# Altium schematic symbol library aeronist-Schematic-Lib.SchLib: 75 symbols (part 2 of 2)
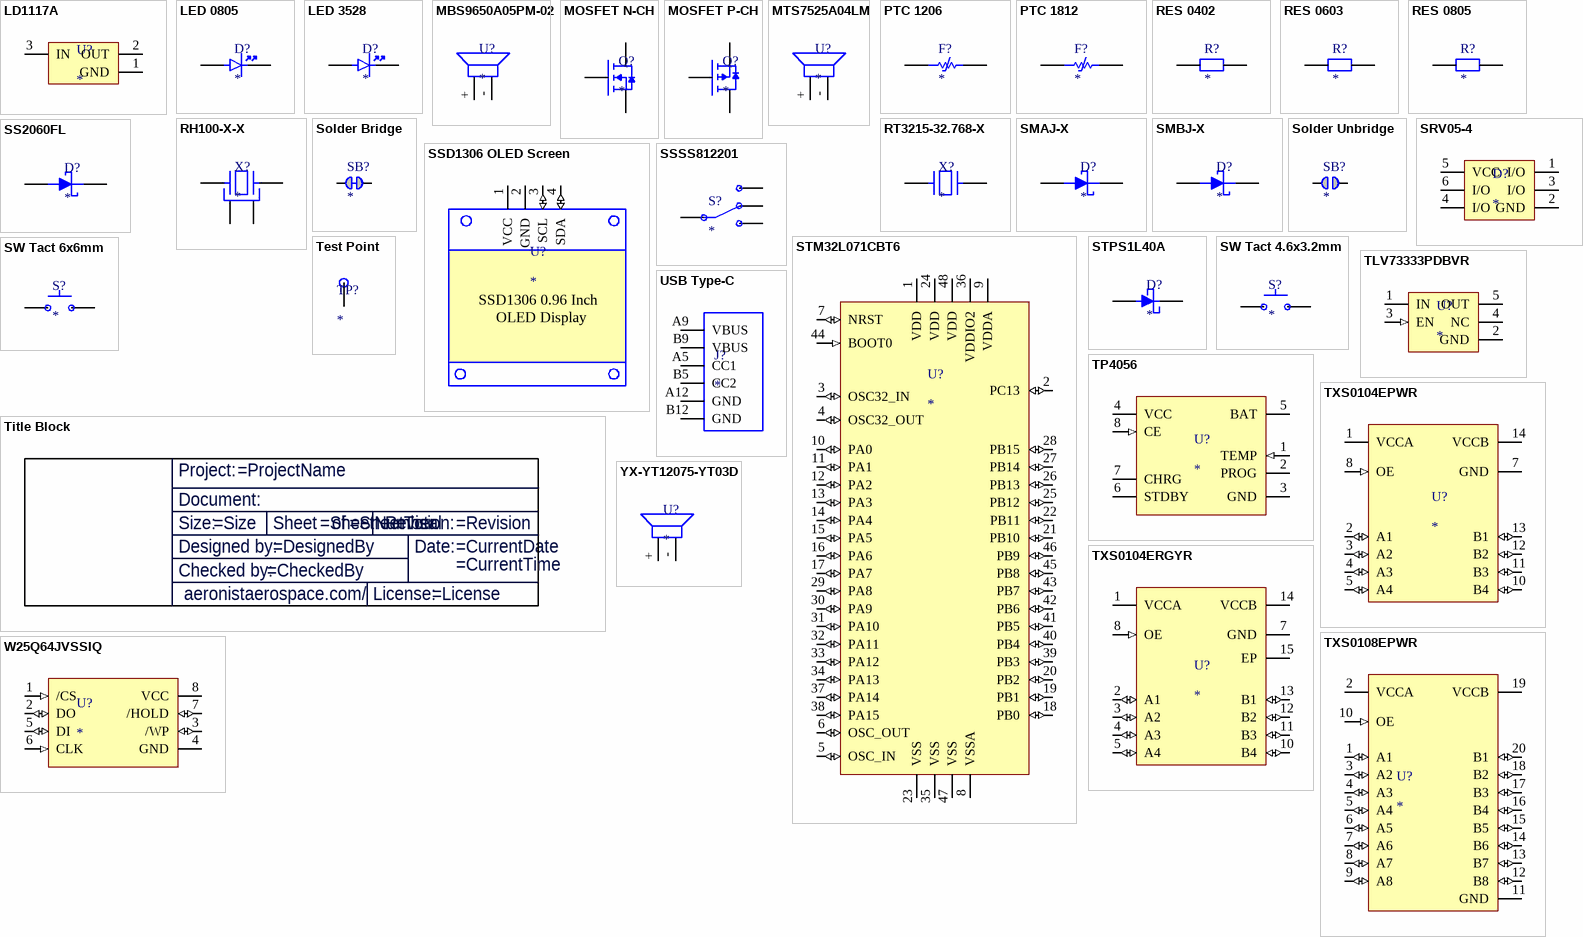
[diagram p2: symbols LD1117A to YX-YT12075-YT03D]

## STPS1L40A
designator D?
Rectifier Diode, Schottky, 1 Phase, 1 Element, 1A, 40V V(RRM), Silicon, DO-214AC; Manufacturer: STMicroelectronics; Manufacturer Part Number: STPS1L40A; Element Configuration: Single; Forward Voltage: 630mV; Max Forward Surge Current (Ifsm): 60A; Max Junction Temperature (Tj): 175°C; Max Reverse Leakage Current: 35µA; Number of Elements: 1; Peak Non-Repetitive Surge Current: 50A; Polarity: Standard; Supplier: Farnell; Supplier Part Number: 1697510; RoHS: Compliant; Category: Schottky Diodes; Stock: 13992; Pricing: 5=0,335, 10=0,209, 100=0,151, 500=0,113, 1000=0,0899, 5000=0,0842 (EUR); Average Rectified Current: 1A; Case/Package: SMA; China RoHS: Non-Compliant; Contact Plating: Tin; Current Rating: 1A; Forward Current: 1A; Height: 2.45mm; Lead Free: Lead Free; Length: 4.6mm; Lifecycle Status: Production; Max Operating Temperature: 150°C; Max Output current: 1A; Max Repetitive Reverse Voltage (Vrrm): 40V; Max Reverse Voltage (DC): 40V; Max Surge Current: 60A; Min Operating Temperature: -65°C; Mounting Technology: Surface Mount; Pins: 2; Number of Terminals: 2; Output Current: 1A; Packaging: Tape and Reel; Peak Reverse Current: 35µA; Radiation Hardening: No; REACH SVHC: No; Reverse Standoff Voltage: 40V; Schedule B: 8541100080, 8541100080|8541100080|8541100080|8541100080|8541100080; Termination: SMD/SMT; Voltage Rating (DC): 40V; Width: 2.95mm; ComponentLink1URL: https://datasheet.octopart.com:443/STPS1L40A-STMicroelectronics-datasheet-8130128.pdf?src-supplier=element14+APAC; ComponentLink1Description: https://datasheet.octopart.com:443/STPS1L40A-STMicroelectronics-datasheet-8130128.pdf?src-supplier=element14+APAC; ComponentLink2URL: https://datasheet.octopart.com:443/STPS1L40A-STMicroelectronics-datasheet-12555403.pdf?src-supplier=TME; ComponentLink2Description: https://datasheet.octopart.com:443/STPS1L40A-STMicroelectronics-datasheet-12555403.pdf?src-supplier=TME; ComponentLink3URL: https://datasheet.octopart.com:443/STPS1L40A-STMicroelectronics-datasheet-67360113.pdf?src-supplier=Future+Electronics; ComponentLink3Description: https://datasheet.octopart.com:443/STPS1L40A-STMicroelectronics-datasheet-67360113.pdf?src-supplier=Future+Electronics; ComponentLink4URL: https://datasheet.octopart.com:443/STPS1L40A-STMicroelectronics-datasheet-56319.pdf?src-supplier=Mouser; ComponentLink4Description: https://datasheet.octopart.com:443/STPS1L40A-STMicroelectronics-datasheet-56319.pdf?src-supplier=Mouser; ComponentLink5URL: https://datasheet.octopart.com:443/STPS1L40A-STMicroelectronics-datasheet-14054142.pdf?src-supplier=iiiC; ComponentLink5Description: https://datasheet.octopart.com:443/STPS1L40A-STMicroelectronics-datasheet-14054142.pdf?src-supplier=iiiC
footprint SMA (SMA, 2-Leads, Body 4,28x2,58mm, IPC Low Density)
pins: 1 A, 2 K

## SW Tact 4.6x3.2mm
designator S?
4.6×3.2 mm tactile push-button switch, SPST, momentary, SMD.
footprint SW TACT 4.6X3.2MM
pins: 2, 4

## SW Tact 6x6mm
designator S?
6×6 mm tactile push-button switch, SPST, momentary, SMD.
footprint SW TACT 6X6MM (6×6 mm SMD tactile switch, 4 pads)
pins: 2, 4

## Test Point
designator TP?
Test Point, PCB Pad Only, Ø1.2mm
footprint Test Point (Test Point, PCB Pad Only, Ø1.2mm)
pins: TP

## Title Block
designator ?  (graphical)
text: Project:; Document:; Size:; Sheet; of; Revision:; Designed by:; Date:; Checked by:; aeronistaerospace.com/; License:

## TLV73333PDBVR
designator U?
300-mA, capacitor-free, low-IQ, low-dropout voltage regulator with enable 5-SOT-23 -40 to 125; Manufacturer: Texas Instruments; Manufacturer Part Number: TLV73333PDBVR; Manufacturer Lifecycle Status: ACTIVE; Accuracy: 1%; Dropout Voltage: 125mV; Max Supply Voltage: 5.5V; Max Junction Temperature (Tj): 125°C; Max Output current: 300mA; Min Current Limit: 360mA; Min Input Voltage: 1.4V; Nominal Supply Current: 34µA; Number of Channels: 1; Output Type: Fixed; Output Voltage: 3.3V; Polarity: Positive; Quiescent Current: 60µA; Supplier: Mouser; Supplier Part Number: 595-TLV73333PDBVR; RoHS: Compliant; Category: LDO Voltage Regulators; Stock: 12067; Pricing: 1=0,17, 10=0,115, 50=0,101, 100=0,086, 1000=0,07, 10000=0,062 (USD); Case/Package: SOT-23; Contact Plating: Gold; Height: 1.45mm; Lead Free: Lead Free; Length: 2.9mm; Lifecycle Status: Production; Max Operating Temperature: 125°C; Min Operating Temperature: -40°C; Min Supply Voltage: 1.4V; Mounting Technology: Surface Mount; Number of Outputs: 1; Pins: 5; Number of Regulators: 1; Output Current: 300mA; Packaging: Tape & Reel; Radiation Hardening: No; Schedule B: 8542390000, 8542390000|8542390000|8542390000|8542390000|8542390000; Thickness: 1.2mm; Weight: 15.790684mg; Width: 1.6mm; ComponentLink1URL: https://sigma.octopart.com:443/177332311/technical_drawing/Texas-Instruments-TLV73333PDBVR.pdf?src-supplier=Texas+Instruments; ComponentLink1Description: https://sigma.octopart.com:443/177332311/technical_drawing/Texas-Instruments-TLV73333PDBVR.pdf?src-supplier=Texas+Instruments; ComponentLink2URL: https://octopart.com:443/opatz8j6/c1?t=30rxbCOKURE0fvLotVHr2--9yC-4hWgg0fjorl7QajC5RXkKBG22M4ZWLOTtqEVkHrkQWGSvUBCT4JzFCKRza57xxEH2AM5zMdrmzUF7HUn0SZ7VrBnq1qaBEhnASKZ9K6cpMGD6K96mHw2RuAXFnqi8r3hf25pr5WVy_93zC9DtrJ2-QNFvwlrZk1EXJAO4qYO9518NXgqDx2DdBm28by8vGuJzgOvU8mXkfRtT8k19nHvP1ZfIaADJPU6FeaqlEbd-j24xmPfxYt-FfVEHWXt0tW1yZYApp5WPtqSvL-aKGKcx1420oXKrzNb7imis-_kE6QqMT633l-x_OdY6nHSWd6_HrFJGfkvfwlphIUbgO9Y3y8pg3cXI5t7uujLqBDPZRvw&src-supplier=Texas+Instruments; ComponentLink2Description: https://octopart.com:443/opatz8j6/c1?t=30rxbCOKURE0fvLotVHr2--9yC-4hWgg0fjorl7QajC5RXkKBG22M4ZWLOTtqEVkHrkQWGSvUBCT4JzFCKRza57xxEH2AM5zMdrmzUF7HUn0SZ7VrBnq1qaBEhnASKZ9K6cpMGD6K96mHw2RuAXFnqi8r3hf25pr5WVy_93zC9DtrJ2-QNFvwlrZk1EXJAO4qYO9518NXgqDx2DdBm28by8vGuJzgOvU8mXkfRtT8k19nHvP1ZfIaADJPU6FeaqlEbd-j24xmPfxYt-FfVEHWXt0tW1yZYApp5WPtqSvL-aKGKcx1420oXKrzNb7imis-_kE6QqMT633l-x_OdY6nHSWd6_HrFJGfkvfwlphIUbgO9Y3y8pg3cXI5t7uujLqBDPZRvw&src-supplier=Texas+Instruments; ComponentLink3URL: https://sigma.octopart.com:443/175570406/technical_drawing/Texas-Instruments-TLV73333PDBVR.pdf?src-supplier=Texas+Instruments; ComponentLink3Description: https://sigma.octopart.com:443/175570406/technical_drawing/Texas-Instruments-TLV73333PDBVR.pdf?src-supplier=Texas+Instruments; ComponentLink4URL: https://sigma.octopart.com:443/169406034/technical_drawing/Texas-Instruments-TLV73333PDBVR.pdf?src-supplier=Texas+Instruments; ComponentLink4Description: https://sigma.octopart.com:443/169406034/technical_drawing/Texas-Instruments-TLV73333PDBVR.pdf?src-supplier=Texas+Instruments; ComponentLink5URL: https://sigma.octopart.com:443/155939316/technical_drawing/Texas-Instruments-TLV73333PDBVR.pdf?src-supplier=Texas+Instruments; ComponentLink5Description: https://sigma.octopart.com:443/155939316/technical_drawing/Texas-Instruments-TLV73333PDBVR.pdf?src-supplier=Texas+Instruments; ComponentLink6URL: https://sigma.octopart.com:443/102331370/technical_drawing/Texas-Instruments-TLV73333PDBVR.pdf?src-supplier=Texas+Instruments; ComponentLink6Description: https://sigma.octopart.com:443/102331370/technical_drawing/Texas-Instruments-TLV73333PDBVR.pdf?src-supplier=Texas+Instruments; ComponentLink7URL: https://datasheet.octopart.com:443/TLV73333PDBVR-Texas-Instruments-datasheet-37736395.pdf?src-supplier=Texas+Instruments; ComponentLink7Description: https://datasheet.octopart.com:443/TLV73333PDBVR-Texas-Instruments-datasheet-37736395.pdf?src-supplier=Texas+Instruments; ComponentLink8URL: https://datasheet.octopart.com:443/TLV73333PDBVR-Texas-Instruments-datasheet-34151877.pdf?src-supplier=Texas+Instruments; ComponentLink8Description: https://datasheet.octopart.com:443/TLV73333PDBVR-Texas-Instruments-datasheet-34151877.pdf?src-supplier=Texas+Instruments; ComponentLink9URL: https://sigma.octopart.com:443/49249325/technical_drawing/Texas-Instruments-TLV73333PDBVR.pdf?src-supplier=Texas+Instruments; ComponentLink9Description: https://sigma.octopart.com:443/49249325/technical_drawing/Texas-Instruments-TLV73333PDBVR.pdf?src-supplier=Texas+Instruments; ComponentLink10URL: https://datasheet.octopart.com:443/TLV73333PDBVR-Texas-Instruments-datasheet-32043788.pdf?src-supplier=Texas+Instruments; ComponentLink10Description: https://datasheet.octopart.com:443/TLV73333PDBVR-Texas-Instruments-datasheet-32043788.pdf?src-supplier=Texas+Instruments; ComponentLink11URL: https://datasheet.octopart.com:443/TLV73333PDBVR-Texas-Instruments-datasheet-159114894.pdf?src-supplier=Augswan; ComponentLink11Description: https://datasheet.octopart.com:443/TLV73333PDBVR-Texas-Instruments-datasheet-159114894.pdf?src-supplier=Augswan; ComponentLink12URL: https://datasheet.octopart.com:443/TLV73333PDBVR-Texas-Instruments-datasheet-159117831.pdf?src-supplier=LCSC; ComponentLink12Description: https://datasheet.octopart.com:443/TLV73333PDBVR-Texas-Instruments-datasheet-159117831.pdf?src-supplier=LCSC; ComponentLink13URL: http://sigma.octopart.com:80/conflict_mineral_statement/Texas-Instruments-company-63.pdf?src-supplier=Compliance+Statements; ComponentLink13Description: http://sigma.octopart.com:80/conflict_mineral_statement/Texas-Instruments-company-63.pdf?src-supplier=Compliance+Statements; ComponentLink14URL: http://sigma.octopart.com:80/reach_statement/Texas-Instruments-company-64.pdf?src-supplier=Compliance+Statements; ComponentLink14Description: http://sigma.octopart.com:80/reach_statement/Texas-Instruments-company-64.pdf?src-supplier=Compliance+Statements
footprint SOT23-5 (SOT23, 5-Leads, Body 2,90x2,80mm, Pitch 0,95mm, IPC Low Density)
pins: 1 IN (power), 2 GND (power), 3 EN (in), 4 NC, 5 OUT (power)

## TP4056
designator U?
Linear Li-Ion battery charger IC symbol (TP4056) with CC/CV charging control.
footprint SOP-8 (JEDEC MS-012 compliant SOP-8 footprint with 1.27mm pitch, 6mm body width, 4.9mm body length)
pins: 1 TEMP (in), 2 PROG, 3 GND (power), 4 VCC (power), 5 BAT (power), 6 STDBY (oc), 7 CHRG (oc), 8 CE (in)

## TXS0104EPWR
designator U?
Four-bit bidirectional voltage-level shifter for open-drain and push-pull applications 14-TSSOP -40 to 85; Manufacturer: Texas Instruments; Manufacturer Part Number: TXS0104EPWR; Manufacturer Lifecycle Status: ACTIVE; Data Rate: 24mbps; High Level Output Current: -20µA; Logic Function: Translator; Low Level Output Current: 1mA; Max Junction Temperature (Tj): 150°C; Max Supply Voltage: 5.5V; Min Supply Voltage: 1.65V; Number of Bits: 4; Output Current: 50mA; Propagation Delay: 4.6ns; Quiescent Current: 14.4µA; Turn-On Delay Time: 260ns; Supplier: Mouser; Supplier Part Number: 595-TXS0104EPWR; RoHS: Compliant; Category: Voltage Level Shifters; Stock: 381; Pricing: 1=0,89, 1=1,57, 10=0,637, 10=0,998, 25=0,886, 50=0,574, 100=0,505, 100=0,734, 250=0,641, 500=0,607, 1000=0,422, 1000=0,51, 2000=0,51, 4000=0,465, 8000=0,426, 10000=0,422 (USD); Ambient Temperature Range High: 85°C; Case/Package: TSSOP; Height: 0m; Lead Free: Lead Free; Length: 5mm; Lifecycle Status: Production; Max Operating Temperature: 85°C; Min Operating Temperature: -40°C; Mounting Technology: Surface Mount; Number of Channels: 4; Number of Circuits: 4; Number of Inputs: 4; Number of Outputs: 4; Pins: 14; Output Type: Voltage; Radiation Hardening: No; REACH SVHC: No; Schedule B: 8542390000, 8542390000|8542390000|8542390000|8542390000|8542390000; Thickness: 1mm; Topology: Push-Pull; Weight: 57.209338mg; Width: 4.4mm; ComponentLink1URL: https://sigma.octopart.com:443/182471031/technical_drawing/Texas-Instruments-TXS0104EPWR.pdf?src-supplier=Texas+Instruments; ComponentLink1Description: https://sigma.octopart.com:443/182471031/technical_drawing/Texas-Instruments-TXS0104EPWR.pdf?src-supplier=Texas+Instruments; ComponentLink2URL: https://octopart.com:443/opatz8j6/c1?t=Ifwx3b9vm9vd-7oxZ-dQL20W4KPCLSFuQ590_slfs3tmdwOAfUofflRvsfbL2YbQXw0JcofC_wSKx2njm0XJgjakp3dVldkC24SbqbLj5mqiESmUiw0iJaDTdaDk6Ch2gVPA-7yI_zHXFjqvyKFLiUWwYDkzbZyaC7-lF28XKw757m1sBEpUHJTqXJxo20KsNBonLwL0_eL4vrrDO7E-wkGzz-y210HPMQQq2A6XaO39QdI91RNnLB66Q0gbDPwWZt3gT9lCJzSpJ8u6S46cxqj55EhEOryumF5bMN0Xspikk3wnzYqE0pC8C3xBFmSalBhUKUE3Xk8ZmwtYQRZSnN6BJnIQf1UoSk95LffLHicvdhNHp3g8SPqhrkJmniLYL3Rc7Q&src-supplier=Texas+Instruments; ComponentLink2Description: https://octopart.com:443/opatz8j6/c1?t=Ifwx3b9vm9vd-7oxZ-dQL20W4KPCLSFuQ590_slfs3tmdwOAfUofflRvsfbL2YbQXw0JcofC_wSKx2njm0XJgjakp3dVldkC24SbqbLj5mqiESmUiw0iJaDTdaDk6Ch2gVPA-7yI_zHXFjqvyKFLiUWwYDkzbZyaC7-lF28XKw757m1sBEpUHJTqXJxo20KsNBonLwL0_eL4vrrDO7E-wkGzz-y210HPMQQq2A6XaO39QdI91RNnLB66Q0gbDPwWZt3gT9lCJzSpJ8u6S46cxqj55EhEOryumF5bMN0Xspikk3wnzYqE0pC8C3xBFmSalBhUKUE3Xk8ZmwtYQRZSnN6BJnIQf1UoSk95LffLHicvdhNHp3g8SPqhrkJmniLYL3Rc7Q&src-supplier=Texas+Instruments; ComponentLink3URL: https://datasheet.octopart.com:443/TXS0104EPWR-Texas-Instruments-datasheet-17423550.pdf?src-supplier=Texas+Instruments; ComponentLink3Description: https://datasheet.octopart.com:443/TXS0104EPWR-Texas-Instruments-datasheet-17423550.pdf?src-supplier=Texas+Instruments; ComponentLink4URL: https://datasheet.octopart.com:443/TXS0104EPWR-Texas-Instruments-datasheet-10254998.pdf?src-supplier=Texas+Instruments; ComponentLink4Description: https://datasheet.octopart.com:443/TXS0104EPWR-Texas-Instruments-datasheet-10254998.pdf?src-supplier=Texas+Instruments; ComponentLink5URL: https://sigma.octopart.com:443/49249819/technical_drawing/Texas-Instruments-TXS0104EPWR.pdf?src-supplier=Texas+Instruments; ComponentLink5Description: https://sigma.octopart.com:443/49249819/technical_drawing/Texas-Instruments-TXS0104EPWR.pdf?src-supplier=Texas+Instruments; ComponentLink6URL: https://datasheet.octopart.com:443/TXS0104EPWR-Texas-Instruments-datasheet-151984.pdf?src-supplier=Texas+Instruments; ComponentLink6Description: https://datasheet.octopart.com:443/TXS0104EPWR-Texas-Instruments-datasheet-151984.pdf?src-supplier=Texas+Instruments; ComponentLink7URL: https://datasheet.octopart.com:443/TXS0104EPWR-Texas-Instruments-datasheet-34148596.pdf?src-supplier=Farnell; ComponentLink7Description: https://datasheet.octopart.com:443/TXS0104EPWR-Texas-Instruments-datasheet-34148596.pdf?src-supplier=Farnell; ComponentLink8URL: https://datasheet.octopart.com:443/TXS0104EPWR-Texas-Instruments-datasheet-21828336.pdf?src-supplier=Farnell; ComponentLink8Description: https://datasheet.octopart.com:443/TXS0104EPWR-Texas-Instruments-datasheet-21828336.pdf?src-supplier=Farnell; ComponentLink9URL: https://datasheet.octopart.com:443/TXS0104EPWR-Texas-Instruments-datasheet-17023331.pdf?src-supplier=Upverter; ComponentLink9Description: https://datasheet.octopart.com:443/TXS0104EPWR-Texas-Instruments-datasheet-17023331.pdf?src-supplier=Upverter; ComponentLink10URL: https://datasheet.octopart.com:443/TXS0104EPWR-Texas-Instruments-datasheet-66618006.pdf?src-supplier=element14+APAC; ComponentLink10Description: https://datasheet.octopart.com:443/TXS0104EPWR-Texas-Instruments-datasheet-66618006.pdf?src-supplier=element14+APAC; ComponentLink11URL: https://datasheet.octopart.com:443/TXS0104EPWR.-Texas-Instruments-datasheet-48033022.pdf?src-supplier=element14+APAC; ComponentLink11Description: https://datasheet.octopart.com:443/TXS0104EPWR.-Texas-Instruments-datasheet-48033022.pdf?src-supplier=element14+APAC; ComponentLink12URL: https://datasheet.octopart.com:443/TXS0104EPWR-Texas-Instruments-datasheet-32026794.pdf?src-supplier=Newark; ComponentLink12Description: https://datasheet.octopart.com:443/TXS0104EPWR-Texas-Instruments-datasheet-32026794.pdf?src-supplier=Newark; ComponentLink13URL: https://datasheet.octopart.com:443/TXS0104EPWR-Texas-Instruments-datasheet-164421215.pdf?src-supplier=SHENGYU+ELECTRONICS; ComponentLink13Description: https://datasheet.octopart.com:443/TXS0104EPWR-Texas-Instruments-datasheet-164421215.pdf?src-supplier=SHENGYU+ELECTRONICS; ComponentLink14URL: https://datasheet.octopart.com:443/TXS0104EPWR-Texas-Instruments-datasheet-165804952.pdf?src-supplier=LCSC; ComponentLink14Description: https://datasheet.octopart.com:443/TXS0104EPWR-Texas-Instruments-datasheet-165804952.pdf?src-supplier=LCSC; ComponentLink15URL: https://datasheet.octopart.com:443/TXS0104EPWR-Texas-Instruments-datasheet-159118389.pdf?src-supplier=LCSC; ComponentLink15Description: https://datasheet.octopart.com:443/TXS0104EPWR-Texas-Instruments-datasheet-159118389.pdf?src-supplier=LCSC; ComponentLink16URL: https://datasheet.octopart.com:443/TXS0104EPWR-Texas-Instruments-datasheet-137316104.pdf?src-supplier=Future+Electronics; ComponentLink16Description: https://datasheet.octopart.com:443/TXS0104EPWR-Texas-Instruments-datasheet-137316104.pdf?src-supplier=Future+Electronics; ComponentLink17URL: https://datasheet.octopart.com:443/TXS0104EPWR-Texas-Instruments-datasheet-10979038.pdf?src-supplier=Arrow+Electronics; ComponentLink17Description: https://datasheet.octopart.com:443/TXS0104EPWR-Texas-Instruments-datasheet-10979038.pdf?src-supplier=Arrow+Electronics; ComponentLink18URL: https://datasheet.octopart.com:443/TXS0104EPWR-Texas-Instruments-datasheet-18313.pdf?src-supplier=DigiKey; ComponentLink18Description: https://datasheet.octopart.com:443/TXS0104EPWR-Texas-Instruments-datasheet-18313.pdf?src-supplier=DigiKey; ComponentLink19URL: http://sigma.octopart.com:80/reach_statement/Texas-Instruments-company-64.pdf?src-supplier=Compliance+Statements; ComponentLink19Description: http://sigma.octopart.com:80/reach_statement/Texas-Instruments-company-64.pdf?src-supplier=Compliance+Statements; ComponentLink20URL: http://sigma.octopart.com:80/conflict_mineral_statement/Texas-Instruments-company-63.pdf?src-supplier=Compliance+Statements; ComponentLink20Description: http://sigma.octopart.com:80/conflict_mineral_statement/Texas-Instruments-company-63.pdf?src-supplier=Compliance+Statements
footprint TSSOP-14 (TSSOP-14, 14-Leads, Body 5,00x4,40mm, Pitch 0,65mm, IPC Low Density)
pins: 1 VCCA (power), 2 A1 (io), 3 A2 (io), 4 A3 (io), 5 A4 (io), 7 GND (power), 8 OE (in), 10 B4 (io), 11 B3 (io), 12 B2 (io), 13 B1 (io), 14 VCCB (power)

## TXS0104ERGYR
designator U?
Four-bit bidirectional voltage-level shifter for open-drain and push-pull applications 14-VQFN -40 to 85; Manufacturer: Texas Instruments; Manufacturer Part Number: TXS0104ERGYR; Manufacturer Lifecycle Status: ACTIVE; Data Rate: 24mbps; High Level Output Current: -20µA; Logic Function: Translator; Low Level Output Current: 1mA; Max Junction Temperature (Tj): 150°C; Max Supply Voltage: 5.5V; Min Supply Voltage: 1.65V; Number of Bits: 4; Number of Outputs: 1; Propagation Delay: 260ns; Quiescent Current: 14.4µA; Supplier: Mouser; Supplier Part Number: 595-TXS0104ERGYR; RoHS: Compliant; Category: Voltage Level Shifters; Stock: 2192; Pricing: 1=1,75, 10=1,12, 50=1, 100=0,824, 1000=0,572, 10000=0,477 (USD); Ambient Temperature Range High: 85°C; Case/Package: VQFN; Height: 1mm; Lead Free: Lead Free; Length: 3.5mm; Lifecycle Status: Production; Max Operating Temperature: 85°C; Min Operating Temperature: -40°C; Mounting Technology: Surface Mount; Number of Channels: 4; Number of Circuits: 4; Number of Inputs: 4; Pins: 14; Output Type: Voltage; Radiation Hardening: No; REACH SVHC: No; Schedule B: 8542390000, 8542390000|8542390000|8542390000|8542390000|8542390000; Termination: SMD/SMT; Thickness: 900µm; Topology: Push-Pull; Turn-On Delay Time: 260ns; Weight: 32.205058mg; Width: 3.5mm; ComponentLink1URL: https://sigma.octopart.com:443/183889324/technical_drawing/Texas-Instruments-TXS0104ERGYR.pdf?src-supplier=Texas+Instruments; ComponentLink1Description: https://sigma.octopart.com:443/183889324/technical_drawing/Texas-Instruments-TXS0104ERGYR.pdf?src-supplier=Texas+Instruments; ComponentLink2URL: https://octopart.com:443/opatz8j6/c1?t=xVBGTrUMwakIB2VMHsXsxFUFoPPT116Fsct1EWR9IwfXtqfzdT-xgAxW5td2RsbUlxN5IpaEpB4BuRdG8tMDFxpQIH58bRCAg85QcnzMA2iX5Assfic2EhPQupKuLb_cOTMFWPcXTxS2FUOoAhYOK1w-GfJlQcIkMH9-B3PKcGFJzuVIUGJVi6wZN00izmAKVlwLJHwpRzhvGfN5ZsevnHBOdT1f977CqvXWcq1EqP2cdaj__zsiItfH1PHfS6TsDAssu1BPNBol1VPjq_1IDPaqyAgjdLA9OBhVf2YXS4dAW6zVEFWevrINt7e5qdo0VTMiHp_a4jdlpT7TaxEF9CWdjquLYdVJ0c4eakITkpijkklV4FFSG-75YO-DnXU4D48feA&src-supplier=Texas+Instruments; ComponentLink2Description: https://octopart.com:443/opatz8j6/c1?t=xVBGTrUMwakIB2VMHsXsxFUFoPPT116Fsct1EWR9IwfXtqfzdT-xgAxW5td2RsbUlxN5IpaEpB4BuRdG8tMDFxpQIH58bRCAg85QcnzMA2iX5Assfic2EhPQupKuLb_cOTMFWPcXTxS2FUOoAhYOK1w-GfJlQcIkMH9-B3PKcGFJzuVIUGJVi6wZN00izmAKVlwLJHwpRzhvGfN5ZsevnHBOdT1f977CqvXWcq1EqP2cdaj__zsiItfH1PHfS6TsDAssu1BPNBol1VPjq_1IDPaqyAgjdLA9OBhVf2YXS4dAW6zVEFWevrINt7e5qdo0VTMiHp_a4jdlpT7TaxEF9CWdjquLYdVJ0c4eakITkpijkklV4FFSG-75YO-DnXU4D48feA&src-supplier=Texas+Instruments; ComponentLink3URL: https://datasheet.octopart.com:443/TXS0104ERGYR-Texas-Instruments-datasheet-17423550.pdf?src-supplier=Texas+Instruments; ComponentLink3Description: https://datasheet.octopart.com:443/TXS0104ERGYR-Texas-Instruments-datasheet-17423550.pdf?src-supplier=Texas+Instruments; ComponentLink4URL: https://datasheet.octopart.com:443/TXS0104ERGYR-Texas-Instruments-datasheet-10254998.pdf?src-supplier=Texas+Instruments; ComponentLink4Description: https://datasheet.octopart.com:443/TXS0104ERGYR-Texas-Instruments-datasheet-10254998.pdf?src-supplier=Texas+Instruments; ComponentLink5URL: https://sigma.octopart.com:443/49249952/technical_drawing/Texas-Instruments-TXS0104ERGYR.pdf?src-supplier=Texas+Instruments; ComponentLink5Description: https://sigma.octopart.com:443/49249952/technical_drawing/Texas-Instruments-TXS0104ERGYR.pdf?src-supplier=Texas+Instruments; ComponentLink6URL: https://datasheet.octopart.com:443/TXS0104ERGYR-Texas-Instruments-datasheet-151984.pdf?src-supplier=Texas+Instruments; ComponentLink6Description: https://datasheet.octopart.com:443/TXS0104ERGYR-Texas-Instruments-datasheet-151984.pdf?src-supplier=Texas+Instruments; ComponentLink7URL: https://datasheet.octopart.com:443/TXS0104ERGYR-Texas-Instruments-datasheet-34148596.pdf?src-supplier=Farnell; ComponentLink7Description: https://datasheet.octopart.com:443/TXS0104ERGYR-Texas-Instruments-datasheet-34148596.pdf?src-supplier=Farnell; ComponentLink8URL: https://datasheet.octopart.com:443/TXS0104ERGYR-Texas-Instruments-datasheet-66618006.pdf?src-supplier=Farnell; ComponentLink8Description: https://datasheet.octopart.com:443/TXS0104ERGYR-Texas-Instruments-datasheet-66618006.pdf?src-supplier=Farnell; ComponentLink9URL: https://datasheet.octopart.com:443/TXS0104ERGYR-Texas-Instruments-datasheet-48033022.pdf?src-supplier=Farnell; ComponentLink9Description: https://datasheet.octopart.com:443/TXS0104ERGYR-Texas-Instruments-datasheet-48033022.pdf?src-supplier=Farnell; ComponentLink10URL: https://datasheet.octopart.com:443/TXS0104ERGYR-Texas-Instruments-datasheet-17023331.pdf?src-supplier=Farnell; ComponentLink10Description: https://datasheet.octopart.com:443/TXS0104ERGYR-Texas-Instruments-datasheet-17023331.pdf?src-supplier=Farnell; ComponentLink11URL: https://datasheet.octopart.com:443/TXS0104ERGYR-Texas-Instruments-datasheet-21828336.pdf?src-supplier=Farnell; ComponentLink11Description: https://datasheet.octopart.com:443/TXS0104ERGYR-Texas-Instruments-datasheet-21828336.pdf?src-supplier=Farnell; ComponentLink12URL: https://datasheet.octopart.com:443/TXS0104ERGYR-Texas-Instruments-datasheet-164421215.pdf?src-supplier=SHENGYU+ELECTRONICS; ComponentLink12Description: https://datasheet.octopart.com:443/TXS0104ERGYR-Texas-Instruments-datasheet-164421215.pdf?src-supplier=SHENGYU+ELECTRONICS; ComponentLink13URL: https://datasheet.octopart.com:443/TXS0104ERGYR-Texas-Instruments-datasheet-165804952.pdf?src-supplier=LCSC; ComponentLink13Description: https://datasheet.octopart.com:443/TXS0104ERGYR-Texas-Instruments-datasheet-165804952.pdf?src-supplier=LCSC; ComponentLink14URL: https://datasheet.octopart.com:443/TXS0104ERGYR-Texas-Instruments-datasheet-159118389.pdf?src-supplier=LCSC; ComponentLink14Description: https://datasheet.octopart.com:443/TXS0104ERGYR-Texas-Instruments-datasheet-159118389.pdf?src-supplier=LCSC; ComponentLink15URL: https://datasheet.octopart.com:443/TXS0104ERGYR-Texas-Instruments-datasheet-137316104.pdf?src-supplier=Future+Electronics; ComponentLink15Description: https://datasheet.octopart.com:443/TXS0104ERGYR-Texas-Instruments-datasheet-137316104.pdf?src-supplier=Future+Electronics; ComponentLink16URL: https://datasheet.octopart.com:443/TXS0104ERGYR-Texas-Instruments-datasheet-10979038.pdf?src-supplier=Arrow+Electronics; ComponentLink16Description: https://datasheet.octopart.com:443/TXS0104ERGYR-Texas-Instruments-datasheet-10979038.pdf?src-supplier=Arrow+Electronics; ComponentLink17URL: https://datasheet.octopart.com:443/TXS0104ERGYR-Texas-Instruments-datasheet-18313.pdf?src-supplier=DigiKey; ComponentLink17Description: https://datasheet.octopart.com:443/TXS0104ERGYR-Texas-Instruments-datasheet-18313.pdf?src-supplier=DigiKey; ComponentLink18URL: http://sigma.octopart.com:80/reach_statement/Texas-Instruments-company-64.pdf?src-supplier=Compliance+Statements; ComponentLink18Description: http://sigma.octopart.com:80/reach_statement/Texas-Instruments-company-64.pdf?src-supplier=Compliance+Statements; ComponentLink19URL: http://sigma.octopart.com:80/conflict_mineral_statement/Texas-Instruments-company-63.pdf?src-supplier=Compliance+Statements; ComponentLink19Description: http://sigma.octopart.com:80/conflict_mineral_statement/Texas-Instruments-company-63.pdf?src-supplier=Compliance+Statements
footprint VQFN-14 (QFN, 14-Leads, Body 3,50x3,50mm, Pitch 1,50mm/0,50mm, Thermal Pad 2,05x2,05mm, IPC Medium Density)
pins: 1 VCCA (power), 2 A1 (io), 3 A2 (io), 4 A3 (io), 5 A4 (io), 7 GND (power), 8 OE (in), 10 B4 (io), 11 B3 (io), 12 B2 (io), 13 B1 (io), 14 VCCB (power), 15 EP (power)

## TXS0108EPWR
designator U?
Eight-bit bidirectional voltage-level shifter for open-drain and push-pull applications 20-TSSOP -40 to 85; Manufacturer: Texas Instruments; Manufacturer Part Number: TXS0108EPWR; Manufacturer Lifecycle Status: ACTIVE; Data Rate: 60Mbps; High Level Output Current: -50mA; Logic Function: Translator; Low Level Output Current: 50mA; Max Junction Temperature (Tj): 150°C; Max Supply Voltage: 5.5V; Min Supply Voltage: 1.4V; Nominal Supply Current: 3µA; Number of Bits: 8; Number of Circuits: 1; Output Current: 620µA; Propagation Delay: 112ns; Rise Time: 6.3ns; Turn-On Delay Time: 312ns; Supplier: Arrow Electronics; Supplier Part Number: TXS0108EPWR; RoHS: Compliant; Category: Voltage Level Shifters; Stock: 26000; Pricing: 2000=0,6816, 4000=0,656, 8000=0,648 (USD); Ambient Temperature Range High: 85°C; Case/Package: TSSOP; Contact Plating: Gold; Height: 0m; Lead Free: Lead Free; Length: 6.5mm; Lifecycle Status: Production; Max Operating Temperature: 85°C; Min Operating Temperature: -40°C; Mounting Technology: Surface Mount; Number of Channels: 8; Number of Inputs: 8; Number of Outputs: 8; Pins: 20; Output Type: Voltage; Packaging: Cut Tape; Quiescent Current: 3µA; Radiation Hardening: No; REACH SVHC: No; Schedule B: 8542390000, 8542390000|8542390000|8542390000|8542390000|8542390000; Termination: SMD/SMT; Thickness: 1mm; Weight: 76.997305mg; Width: 4.4mm; ComponentLink1URL: https://sigma.octopart.com:443/157851284/technical_drawing/Texas-Instruments-TXS0108EPWR.pdf?src-supplier=Texas+Instruments; ComponentLink1Description: https://sigma.octopart.com:443/157851284/technical_drawing/Texas-Instruments-TXS0108EPWR.pdf?src-supplier=Texas+Instruments; ComponentLink2URL: https://octopart.com:443/opatz8j6/c1?t=FSGFvgXVJS-nLPAt6WnFnY7CHsdFhG7wcVKhK9hgGv9FEoe3YMkSQH3cTea3xUlKvu7z9FiX9ZF_NFe3v1VWSmet7nlKzUis9qwjyyqDtfkA7Yv4UjwRcnx9H7aFfCNMRyTow5OcFEdL5uDfwx-ZtFqD-GOybVIaAUEunVcBdZ2e01PjUP1-t1HIGV5QP9Is_w8IlzdUvinBDdAHKYv-gqYI_1iXeEUB2dA1lphLvylb5iy7HUMHNw-P_-RF6-t3V2PrPbrR8fVAB4CFsLW30zDWOOEkn8TluI07D471AU0CZ_ODL4qEASwF8IGlWA9wtn2Mbsr17JK9x60Qp78l7t5Nd-saTS_IepMqH7S73m6XCNkM6OYtUiZ1mnDZpQ5crbaNBw&src-supplier=Texas+Instruments; ComponentLink2Description: https://octopart.com:443/opatz8j6/c1?t=FSGFvgXVJS-nLPAt6WnFnY7CHsdFhG7wcVKhK9hgGv9FEoe3YMkSQH3cTea3xUlKvu7z9FiX9ZF_NFe3v1VWSmet7nlKzUis9qwjyyqDtfkA7Yv4UjwRcnx9H7aFfCNMRyTow5OcFEdL5uDfwx-ZtFqD-GOybVIaAUEunVcBdZ2e01PjUP1-t1HIGV5QP9Is_w8IlzdUvinBDdAHKYv-gqYI_1iXeEUB2dA1lphLvylb5iy7HUMHNw-P_-RF6-t3V2PrPbrR8fVAB4CFsLW30zDWOOEkn8TluI07D471AU0CZ_ODL4qEASwF8IGlWA9wtn2Mbsr17JK9x60Qp78l7t5Nd-saTS_IepMqH7S73m6XCNkM6OYtUiZ1mnDZpQ5crbaNBw&src-supplier=Texas+Instruments; ComponentLink3URL: https://datasheet.octopart.com:443/TXS0108EPWR-Texas-Instruments-datasheet-10257968.pdf?src-supplier=Texas+Instruments; ComponentLink3Description: https://datasheet.octopart.com:443/TXS0108EPWR-Texas-Instruments-datasheet-10257968.pdf?src-supplier=Texas+Instruments; ComponentLink4URL: https://sigma.octopart.com:443/49249835/technical_drawing/Texas-Instruments-TXS0108EPWR.pdf?src-supplier=Texas+Instruments; ComponentLink4Description: https://sigma.octopart.com:443/49249835/technical_drawing/Texas-Instruments-TXS0108EPWR.pdf?src-supplier=Texas+Instruments; ComponentLink5URL: https://datasheet.octopart.com:443/TXS0108EPWR-Texas-Instruments-datasheet-34155243.pdf?src-supplier=element14+APAC; ComponentLink5Description: https://datasheet.octopart.com:443/TXS0108EPWR-Texas-Instruments-datasheet-34155243.pdf?src-supplier=element14+APAC; ComponentLink6URL: https://datasheet.octopart.com:443/TXS0108EPWR-Texas-Instruments-datasheet-101601150.pdf?src-supplier=element14+APAC; ComponentLink6Description: https://datasheet.octopart.com:443/TXS0108EPWR-Texas-Instruments-datasheet-101601150.pdf?src-supplier=element14+APAC; ComponentLink7URL: https://datasheet.octopart.com:443/TXS0108EPWR.-Texas-Instruments-datasheet-66618007.pdf?src-supplier=element14+APAC; ComponentLink7Description: https://datasheet.octopart.com:443/TXS0108EPWR.-Texas-Instruments-datasheet-66618007.pdf?src-supplier=element14+APAC; ComponentLink8URL: https://datasheet.octopart.com:443/TXS0108EPWR.-Texas-Instruments-datasheet-62089077.pdf?src-supplier=element14+APAC; ComponentLink8Description: https://datasheet.octopart.com:443/TXS0108EPWR.-Texas-Instruments-datasheet-62089077.pdf?src-supplier=element14+APAC; ComponentLink9URL: https://datasheet.octopart.com:443/TXS0108EPWR-Texas-Instruments-datasheet-21821524.pdf?src-supplier=element14+APAC; ComponentLink9Description: https://datasheet.octopart.com:443/TXS0108EPWR-Texas-Instruments-datasheet-21821524.pdf?src-supplier=element14+APAC; ComponentLink10URL: https://datasheet.octopart.com:443/TXS0108EPWR-Texas-Instruments-datasheet-157246788.pdf?src-supplier=ODG+(Origin+Data+Global); ComponentLink10Description: https://datasheet.octopart.com:443/TXS0108EPWR-Texas-Instruments-datasheet-157246788.pdf?src-supplier=ODG+(Origin+Data+Global); ComponentLink11URL: https://datasheet.octopart.com:443/TXS0108EPWR-Texas-Instruments-datasheet-15851133.pdf?src-supplier=Newark; ComponentLink11Description: https://datasheet.octopart.com:443/TXS0108EPWR-Texas-Instruments-datasheet-15851133.pdf?src-supplier=Newark; ComponentLink12URL: https://datasheet.octopart.com:443/TXS0108EPWR-Texas-Instruments-datasheet-25361057.pdf?src-supplier=Newark; ComponentLink12Description: https://datasheet.octopart.com:443/TXS0108EPWR-Texas-Instruments-datasheet-25361057.pdf?src-supplier=Newark; ComponentLink13URL: https://datasheet.octopart.com:443/TXS0108EPWR-Texas-Instruments-datasheet-159118391.pdf?src-supplier=LCSC; ComponentLink13Description: https://datasheet.octopart.com:443/TXS0108EPWR-Texas-Instruments-datasheet-159118391.pdf?src-supplier=LCSC; ComponentLink14URL: https://datasheet.octopart.com:443/TXS0108EPWR-Texas-Instruments-datasheet-104531687.pdf?src-supplier=TME; ComponentLink14Description: https://datasheet.octopart.com:443/TXS0108EPWR-Texas-Instruments-datasheet-104531687.pdf?src-supplier=TME; ComponentLink15URL: https://datasheet.octopart.com:443/TXS0108EPWR-Texas-Instruments-datasheet-140572054.pdf?src-supplier=Arrow.cn; ComponentLink15Description: https://datasheet.octopart.com:443/TXS0108EPWR-Texas-Instruments-datasheet-140572054.pdf?src-supplier=Arrow.cn; ComponentLink16URL: https://datasheet.octopart.com:443/TXS0108EPWR-Texas-Instruments-datasheet-137316104.pdf?src-supplier=Future+Electronics; ComponentLink16Description: https://datasheet.octopart.com:443/TXS0108EPWR-Texas-Instruments-datasheet-137316104.pdf?src-supplier=Future+Electronics; ComponentLink17URL: https://datasheet.octopart.com:443/TXS0108EPWR-Texas-Instruments-datasheet-14151909.pdf?src-supplier=iiiC; ComponentLink17Description: https://datasheet.octopart.com:443/TXS0108EPWR-Texas-Instruments-datasheet-14151909.pdf?src-supplier=iiiC; ComponentLink18URL: https://datasheet.octopart.com:443/TXS0108EPWR-Texas-Instruments-datasheet-11046612.pdf?src-supplier=Farnell; ComponentLink18Description: https://datasheet.octopart.com:443/TXS0108EPWR-Texas-Instruments-datasheet-11046612.pdf?src-supplier=Farnell; ComponentLink19URL: https://datasheet.octopart.com:443/TXS0108EPWR-Texas-Instruments-datasheet-5325602.pdf?src-supplier=Farnell; ComponentLink19Description: https://datasheet.octopart.com:443/TXS0108EPWR-Texas-Instruments-datasheet-5325602.pdf?src-supplier=Farnell; ComponentLink20URL: http://sigma.octopart.com:80/conflict_mineral_statement/Texas-Instruments-company-63.pdf?src-supplier=Compliance+Statements; ComponentLink20Description: http://sigma.octopart.com:80/conflict_mineral_statement/Texas-Instruments-company-63.pdf?src-supplier=Compliance+Statements; ComponentLink21URL: http://sigma.octopart.com:80/reach_statement/Texas-Instruments-company-64.pdf?src-supplier=Compliance+Statements; ComponentLink21Description: http://sigma.octopart.com:80/reach_statement/Texas-Instruments-company-64.pdf?src-supplier=Compliance+Statements
footprint TSSOP-20 (TSSOP, 20-Leads, Body 6,50x4,40mm, Pitch 0,65mm, IPC Low Density)
pins: 1 A1 (io), 2 VCCA (power), 3 A2 (io), 4 A3 (io), 5 A4 (io), 6 A5 (io), 7 A6 (io), 8 A7 (io), 9 A8 (io), 10 OE (in), 11 GND (power), 12 B8 (io), 13 B7 (io), 14 B6 (io), 15 B5 (io), 16 B4 (io), 17 B3 (io), 18 B2 (io), 19 VCCB (power), 20 B1 (io)

## USB Type-C
designator J?
USB Type-C 6-pin SMD female connector. 0.80 mm pitch, SMT right-angle, –40 °C to +85 °C.
footprint USB TYPE-C 6 PIN (USB Type-C 6-pin SMD female, 0.80 mm pitch, right-angle mount.)
pins: A5 CC1, A9 VBUS (power), A12 GND (power), B5 CC2, B9 VBUS (power), B12 GND (power)

## W25Q64JVSSIQ
designator U?
NOR Flash Serial (SPI, Dual SPI, Quad SPI) 3V/3.3V 64M-bit 8M x 8 6ns 8-Pin SOIC T/R/Tray/Tube; Manufacturer: Winbond; Manufacturer Part Number: W25Q64JVSSIQ; Address Bus Width: 24b; Density: 512Mb; Frequency: 133MHz; Max Supply Current: 18mA; Max Supply Voltage: 3.6V; Memory Size: 8MB; Min Supply Voltage: 2.7V; Number of Circuits: 1; Operating Supply Voltage: 3V; Page Size: 256B; Supplier: Arrow Electronics; Supplier Part Number: W25Q64JVSSIQ; RoHS: Compliant; Category: Flash; Stock: 305; Pricing: 90=0,8058, 180=0,804, 270=0,785 (USD); Access Time: 6ns; Ambient Temperature Range High: 85°C; Case/Package: SOIC; China RoHS: Compliant; Height: 2.16mm; Height - Seated (Max): 2.16mm; Interface: Serial; Length: 5.23mm; Lifecycle Status: Production; Clock Frequency: 133MHz; Max Operating Temperature: 85°C; Memory Format: FLASH; Min Operating Temperature: -40°C; Mounting Technology: Surface Mount; Pins: 8; Number of Terminals: 8; REACH SVHC: Yes; Schedule B: 8542320070, 8542320070|8542320070, 8542320070|8542320070|8542320070, 8542320070|8542320070|8542320070|8542320070; Terminal Pitch: 1.27mm; Width: 5.23mm; ComponentLink1URL: https://datasheet.octopart.com:443/W25Q64JVSSIQ-Winbond-datasheet-179437472.pdf?src-supplier=IHS; ComponentLink1Description: https://datasheet.octopart.com:443/W25Q64JVSSIQ-Winbond-datasheet-179437472.pdf?src-supplier=IHS; ComponentLink2URL: https://datasheet.octopart.com:443/W25Q64JVSSIQ-Winbond-datasheet-138898694.pdf?src-supplier=ODG+(Origin+Data+Global); ComponentLink2Description: https://datasheet.octopart.com:443/W25Q64JVSSIQ-Winbond-datasheet-138898694.pdf?src-supplier=ODG+(Origin+Data+Global); ComponentLink3URL: https://sigma.octopart.com:443/138898685/technical_drawing/Winbond-W25Q64JVSSIQ.pdf?src-supplier=Upverter; ComponentLink3Description: https://sigma.octopart.com:443/138898685/technical_drawing/Winbond-W25Q64JVSSIQ.pdf?src-supplier=Upverter
footprint SOP-8 (SOP-8, 8-Leads, Body 4.90x3.90mm, Pitch 1.27mm, IPC Low Density.)
pins: 1 /CS (in), 2 DO (io), 3 /WP (io), 4 GND (power), 5 DI (io), 6 CLK (in), 7 /HOLD (io), 8 VCC

## YX-YT12075-YT03D
designator U?
12 mm magnetic active buzzer, THT, 3 V (2–5 V), 2.7 kHz, 85 dB, 7.6 mm pitch.
footprint YX-YT12075-YT03D
pins: +, -